# EAGLE library part DMR-03-V (library DMR-03-V)
DIP Switches 3 Position 3PST SMD/SMT 24 VDC 25 mA Source: Datasheet
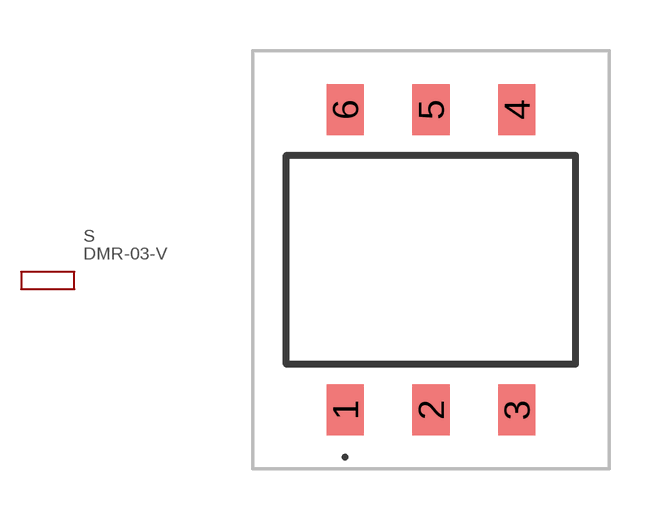
[diagram p0: symbol with the pads of DMR03V; footprint DMR03V]

Designator prefix S

## DMR-03-V (Description: DIP Switches 3 Position 3PST SMD/SMT 24 VDC 25 mA; Height: 4.4mm; Manufacturer_Name: Diptronics; Manufacturer_Part_Number: DMR-03-V; Mouser_Part_Number: 113-DMR03V; Mouser_Price-Stock: https://www.mouser.co.uk/ProductDetail/Diptronics/DMR-03-V?qs=MLItCLRbWszPD8Gf56uzfQ%3D%3D)  [DMR03V]
1  COM1  ?
2  COM2  ?
3  COM3  ?
4  NO3  ?
5  NO2  ?
6  NO1  ?

## Footprint DMR03V (pad centres in mm)
DMR-03-V-2
smd 1.1 x 1.5: 1 -2.54,-4.45; 2 0,-4.45; 3 2.54,-4.45; 4 2.54,4.45; 5 0,4.45; 6 -2.54,4.45